# Altium footprint library Clema_Power_IC.PcbLib: 4 footprints
Each footprint in its own frame and in the unit in brackets; x right, y up, seen from the top. Pads: shape width x height; smd on the part's side, far side on the other; paste and mask are expansions set on the pad; w line width, h text height; cw(c..) or ccw(c..) is an arc to the next point about the centre after c.
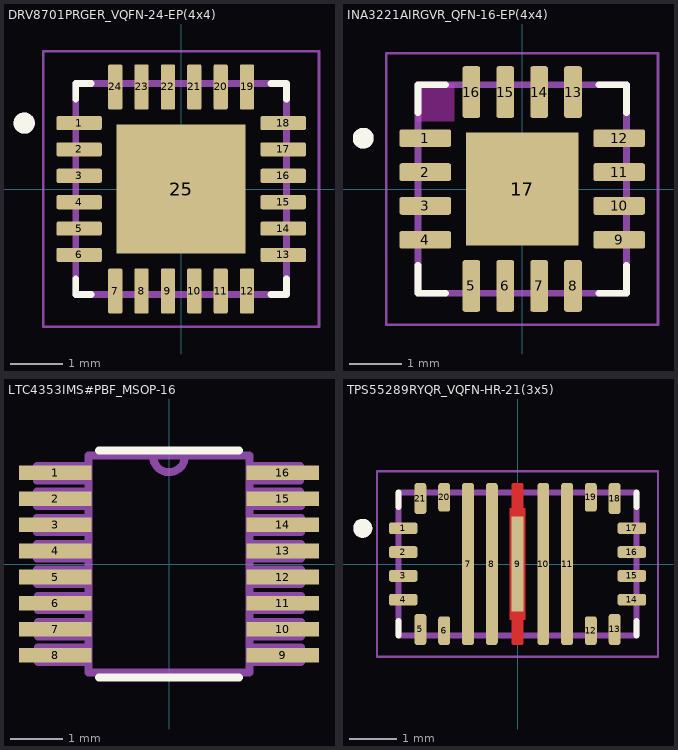
[diagram p0: the footprints below, top view; thin cyan lines are the x and y axes]

## DRV8701PRGER_VQFN-24-EP(4x4) [mm]
height 1
pads (25):
  rrect25% 0.86x0.27 smd paste+0 mask+0.102: 1(-1.935,1.25) 2(-1.935,0.75) 3(-1.935,0.25) 4(-1.935,-0.25) 5(-1.935,-0.75) 6(-1.935,-1.25) 13(1.935,-1.25) 14(1.935,-0.75) 15(1.935,-0.25) 16(1.935,0.25) 17(1.935,0.75) 18(1.935,1.25)
  rrect25% 0.27x0.86 smd paste+0 mask+0.102: 7(-1.25,-1.935) 8(-0.75,-1.935) 9(-0.25,-1.935) 10(0.25,-1.935) 11(0.75,-1.935) 12(1.25,-1.935) 19(1.25,1.935) 20(0.75,1.935) 21(0.25,1.935) 22(-0.25,1.935) 23(-0.75,1.935) 24(-1.25,1.935)
  rect 2.45x2.45 smd paste-0.45 mask+0.102: 25(0,0)
Top Overlay:
  circle w0.2: c-2.975,1.25 r0.1
  lines w0.127: -2,-1.705 -2,-2 -1.705,-2 ; -2,1.705 -2,2 -1.705,2 ; 1.705,-2 2,-2 2,-1.705 ; 1.705,2 2,2 2,1.705
Mechanical 13:
  circle w0.2: c-2.975,1.25 r0.1
  lines w0.127: -2,-2 -2,2 2,2 2,-2 -2,-2
Mechanical 15:
  lines w0.05: -2.615,-2.615 -2.615,2.615 2.615,2.615 2.615,-2.615 -2.615,-2.615
3D body "step_temp.STEP": height 1, standoff 0, extent -2,-2 2,2

## INA3221AIRGVR_QFN-16-EP(4x4) [mm]
pads (17):
  rrect25% 0.99x0.34 smd: 1(-1.86,0.975) 2(-1.86,0.325) 3(-1.86,-0.325) 4(-1.86,-0.975) 9(1.86,-0.975) 10(1.86,-0.325) 11(1.86,0.325) 12(1.86,0.975)
  rrect25% 0.34x0.99 smd: 5(-0.975,-1.86) 6(-0.325,-1.86) 7(0.325,-1.86) 8(0.975,-1.86) 13(0.975,1.86) 14(0.325,1.86) 15(-0.325,1.86) 16(-0.975,1.86)
  rect 2.16x2.16 smd paste-2: 17(0,0)
Top Overlay:
  circle w0.2: c-3.05,0.975 r0.1
  lines w0.127: -2,-1.465 -2,-2 -1.465,-2 ; -2,1.465 -2,2 -1.465,2 ; 1.465,-2 2,-2 2,-1.465 ; 1.465,2 2,2 2,1.465
Top Paste:
  region: 0.68,-0.68 -0.68,-0.68 -0.68,0.68 0.68,0.68
Keep-Out Layer:
  region: -1.3,1.3 -2.02,1.3 -2.02,2.02 -1.3,2.02
Mechanical 13:
  circle w0.2: c-3.05,0.975 r0.1
  lines w0.127: -2,-2 2,-2 2,2 -2,2 -2,-2
Mechanical 15:
  lines w0.05: -2.605,-2.605 2.605,-2.605 2.605,2.605 -2.605,2.605 -2.605,-2.605
3D body "INA3221AIRGVR--3DModel-STEP-56544.STEP": height 1, standoff 0, extent -2,-2 2,2

## LTC4353IMS#PBF_MSOP-16 [mil]
pads (16):
  rect 55x11 smd: 1(-86,68.95) 2(-86,49.25) 3(-86,29.55) 4(-86,9.85) 5(-86,-9.85) 6(-86,-29.55) 7(-86,-49.25) 8(-86,-68.95) 9(86,-68.95) 10(86,-49.25) 11(86,-29.55) 12(86,-9.85) 13(86,9.85) 14(86,29.55) 15(86,49.25) 16(86,68.95)
Top Overlay:
  lines w6: -53,-86 53,-86 ; -53,86 53,86
Mechanical 13:
  lines w6: -12,81.08 ccw(c0,81.5) 12,81.92 ; -100,-15 -100,-4 -61,-4 -61,-15 -100,-15 ; -100,4 -100,15 -61,15 -61,4 -100,4 ; -100,24 -100,35 -61,35 -61,24 -100,24 ; -100,44 -100,55 -61,55 -61,44 -100,44 ; -100,63 -100,74 -61,74 -61,63 -100,63 ; -99,-74 -99,-63 -61,-63 -61,-74 -99,-74 ; -99,-55 -99,-44 -61,-44 -61,-55 -99,-55 ; -99,-35 -99,-24 -61,-24 -61,-35 -99,-35 ; -61,-82 61,-82 61,82 12,82 -61,82 -61,-82 ; 61,-74 61,-63 100,-63 100,-74 61,-74 ; 61,-55 61,-44 100,-44 100,-55 61,-55 ; 61,-35 61,-24 100,-24 100,-35 61,-35 ; 61,-15 61,-4 100,-4 100,-15 61,-15 ; 61,4 61,15 100,15 100,4 61,4 ; 61,24 61,35 100,35 100,24 61,24 ; 61,44 61,55 99,55 100,44 61,44 ; 61,63 61,74 99,74 99,63 61,63
3D body "step_temp.STEP": height 43.65, standoff 0.35, extent -96.46,-79.51 96.46,79.51

## TPS55289RYQR_VQFN-HR-21(3x5) [mm]
height 1
pads (21):
  rrect45% 0.6x0.25 smd mask+0: 1(-2.4,0.75) 2(-2.4,0.25) 3(-2.4,-0.25) 4(-2.4,-0.75) 14(2.4,-0.75) 15(2.4,-0.25) 16(2.4,0.25) 17(2.4,0.75)
  rrect45% 0.25x0.65 smd mask+0: 5(-2.04,-1.375) 13(2.04,-1.375) 18(2.04,1.375) 21(-2.04,1.375)
  rrect45% 0.25x0.6 smd mask+0: 6(-1.54,-1.4) 12(1.54,-1.4) 19(1.54,1.4) 20(-1.54,1.4)
  rrect45% 0.25x3.4 smd paste-3 mask+0: 7(-1.04,0) 8(-0.54,0) 10(0.54,0) 11(1.04,0)
  rect 0.25x2 smd paste-2 mask+0: 9(0,0)
Top Layer:
  region: 0.083,1.699 0.085,1.699 0.088,1.698 0.09,1.698 0.093,1.697 0.095,1.696 0.098,1.695 0.1,1.693 0.102,1.692 0.104,1.69 0.106,1.689 0.108,1.687 0.11,1.685 0.112,1.683 0.114,1.681 0.115,1.679 0.117,1.677 0.118,1.675 0.12,1.673 0.121,1.67 0.122,1.668 0.123,1.665 0.123,1.663 0.124,1.66 0.124,1.658 0.125,1.655 0.125,1.653 0.125,1.65 0.125,1.175 0.165,1.175 0.165,-1.175 0.125,-1.175 0.125,-1.65 0.125,-1.653 0.125,-1.655 0.124,-1.658 0.124,-1.66 0.123,-1.663 0.123,-1.665 0.122,-1.668 0.121,-1.67 0.12,-1.673 0.118,-1.675 0.117,-1.677 0.115,-1.679 0.114,-1.681 0.112,-1.683 0.11,-1.685 0.108,-1.687 0.106,-1.689 0.104,-1.69 0.102,-1.692 0.1,-1.693 0.098,-1.695 0.095,-1.696 0.093,-1.697 0.09,-1.698 0.088,-1.698 0.085,-1.699 0.083,-1.699 0.08,-1.7 -0.08,-1.7 -0.083,-1.699 -0.085,-1.699 -0.088,-1.698 -0.09,-1.698 -0.093,-1.697 -0.095,-1.696 -0.098,-1.695 -0.1,-1.693 -0.102,-1.692 -0.104,-1.69 -0.106,-1.689 -0.108,-1.687 -0.11,-1.685 -0.112,-1.683 -0.114,-1.681 -0.115,-1.679 -0.117,-1.677 -0.118,-1.675 -0.12,-1.673 -0.121,-1.67 -0.122,-1.668 -0.123,-1.665 -0.123,-1.663 -0.124,-1.66 -0.124,-1.658 -0.125,-1.655 -0.125,-1.653 -0.125,-1.65 -0.125,-1.175 -0.165,-1.175 -0.165,1.175 -0.125,1.175 -0.125,1.65 -0.125,1.653 -0.125,1.655 -0.124,1.658 -0.124,1.66 -0.123,1.663 -0.123,1.665 -0.122,1.668 -0.121,1.67 -0.12,1.673 -0.118,1.675 -0.117,1.677 -0.115,1.679 -0.114,1.681 -0.112,1.683 -0.11,1.685 -0.108,1.687 -0.106,1.689 -0.104,1.69 -0.102,1.692 -0.1,1.693 -0.098,1.695 -0.095,1.696 -0.093,1.697 -0.09,1.698 -0.088,1.698 -0.085,1.699 -0.083,1.699 -0.08,1.7 0.08,1.7
Top Overlay:
  circle w0.2: c-3.25,0.75 r0.1
  lines w0.127: -2.5,-1.5 -2.5,-1.195 ; -2.5,1.195 -2.5,1.5 ; 2.5,-1.5 2.5,-1.195 ; 2.5,1.195 2.5,1.5
Top Paste:
  drawing of 15 lines, arcs and shapes, not listed
Top Solder:
  drawing of 21 lines, arcs and shapes, not listed
Mechanical 13:
  circle w0.2: c-3.25,0.75 r0.1
  lines w0.127: -2.5,-1.5 2.5,-1.5 2.5,1.5 -2.5,1.5 -2.5,-1.5
Mechanical 15:
  lines w0.05: -2.95,-1.95 2.95,-1.95 2.95,1.95 -2.95,1.95 -2.95,-1.95
3D body "TPS55289RYQR.STEP": height 0.97, standoff -0.03, extent -2.5,-1.5 2.5,1.5